# Altium footprint library Footprints.PcbLib: 34 footprints (part 2 of 3)
Each footprint in its own frame and in the unit in brackets; x right, y up, seen from the top. Pads: shape width x height; smd on the part's side, far side on the other; paste and mask are expansions set on the pad; w line width, h text height; cw(c..) or ccw(c..) is an arc to the next point about the centre after c.
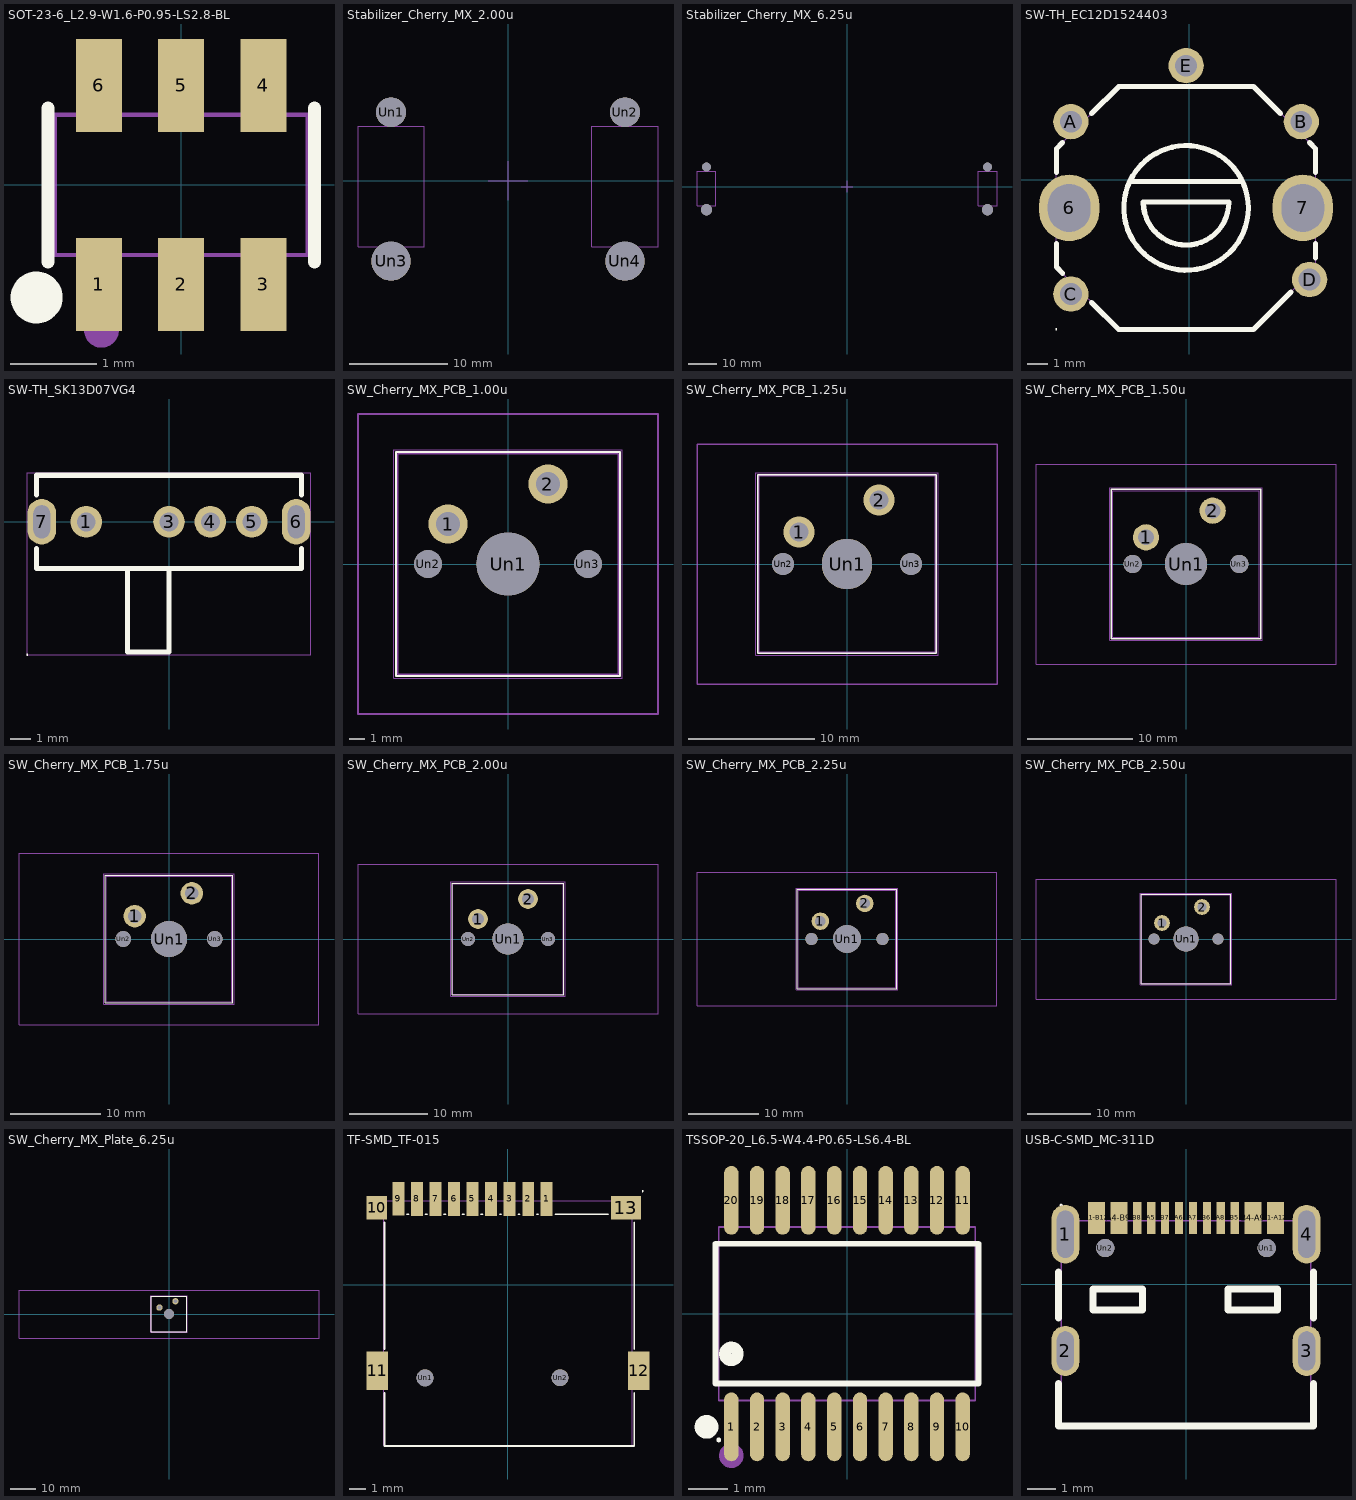
[diagram p1: the footprints below, top view; thin cyan lines are the x and y axes]

## SOT-23-6_L2.9-W1.6-P0.95-LS2.8-BL [mm]
pads (6):
  rect 0.532x1.072 smd: 1(-0.95,-1.15) 2(0,-1.15) 3(0.95,-1.15) 4(0.95,1.15) 5(0,1.15) 6(-0.95,1.15)
F.SilkS:
  circle w0.3: c-1.67,-1.3 r0.15
  circle w0.06: c-1.46,-1.4 r0.03
  lines w0.15: -1.54,-0.89 -1.54,0.89 ; 1.54,-0.89 1.54,0.89
Top Courtyard:
  lines w0.05: -1.46,-0.81 -1.46,0.81 1.46,0.81 1.46,-0.81 -1.46,-0.81
F.Fab:
  text "'.Designator'" at -4.047,-0.84 h1
Cmts.User:
  circle w0.2: c-0.92,-1.68 r0.1
3D body "SOT-23-6_L2.9-W1.6-H1.5-LS2.8-P0.95.step": height 1.6, standoff -0.05, extent -1.45,-1.406 1.45,1.406

## Stabilizer_Cherry_MX_2.00u [mil]
pads (4):
  round 120 hole 120: Un1(-470,275) Un2(470,275)
  round 157 hole 157: Un3(-470,-323.82) Un4(470,-323.82)
Top Assembly:
  lines w3.94: -78.74,0 78.74,0 ; 0,-78.74 0,78.74
F.Fab:
  text "'.Designator'" at -159.32,-33.08 h39.37
Eco1.User:
  lines w3.94: -602.87,-266.54 -337.13,-266.54 -337.13,217.72 -602.87,217.72 -602.87,-266.54 ; 337.13,-266.54 602.87,-266.54 602.87,217.72 337.13,217.72 337.13,-266.54
3D body "Stabilizer_Cherry_MX_2.00u.stp": height 608.27, standoff -112.2, extent -603.94,-433.07 603.94,322.83

## Stabilizer_Cherry_MX_6.25u [mil]
pads (4):
  round 120 hole 120: Un1(-1968.5,275) Un2(1968.5,275)
  round 157 hole 157: Un3(-1968.5,-323.82) Un4(1968.5,-323.82)
Top Assembly:
  lines w3.94: -78.74,0 78.74,0 ; 0,-78.74 0,78.74
F.Fab:
  text "'.Designator'" at -159.32,-33.08 h39.37
Eco1.User:
  lines w3.94: -2101.38,-266.54 -1835.63,-266.54 -1835.63,217.72 -2101.38,217.72 -2101.38,-266.54 ; 1835.63,-266.54 2101.38,-266.54 2101.38,217.72 1835.63,217.72 1835.63,-266.54
3D body "Stabilizer_Cherry_MX_6.25u.stp": height 608.27, standoff -112.2, extent -2102.36,-433.07 2102.36,322.83

## SW-TH_EC12D1524403 [mm]
pads (7):
  rrect100% 2.9x3.2 hole 2.3 slot 2.05 at 0 deg: 6(-5.79,-1.35) 7(5.46,-1.35)
  round 1.7 hole 1.05: A(-5.71,2.8) B(5.39,2.8) C(-5.71,-5.5) D(5.79,-4.8) E(-0.16,5.5)
F.SilkS:
  circle w0.06: c-6.41,-7.2 r0.03
  circle w0.25: c-0.16,-1.35 r3
  lines w0.25: -6.41,-3.06 -6.41,-4.2 -6.12,-4.5 ; -6.41,0.36 -6.41,1.5 -6.11,1.8 ; -4.71,-5.9 -3.42,-7.2 3.08,-7.2 4.89,-5.4 ; -4.71,3.2 -3.42,4.48 ; -3.42,4.5 3.09,4.5 3.09,4.49 4.38,3.2 ; -2.86,-0.08 2.55,-0.08 ; -2.22,-1.12 ccw(c-0.16,-1.08) 1.9,-1.08 ; -2.22,-1.07 1.87,-1.07 ; 5.79,1.8 6.08,1.5 6.08,0.36 ; 6.08,-3.76 6.08,-3.06
Top Courtyard:
  lines w0.05: -6.41,-4.2 -3.41,-7.2 3.09,-7.2 6.09,-4.2 6.09,1.5 3.09,4.5 -3.41,4.5 -6.41,1.5 -6.41,-4.2
F.Fab:
  text "'.Designator'" at -4.047,-0.84 h1
3D body "SW-TH_EC12D1524403-L12.5-W11.7-H17.5-P11.1-LS14.1.step": height 17.5, standoff -3.7, extent -6.377,-7.247 6.123,5.553

## SW-TH_SK13D07VG4 [mil]
pads (6):
  round 60 hole 36: 1(-157.48,0) 3(0,0) 4(78.74,0) 5(157.48,0)
  rrect100% 55.12x86.61 hole 62.99 slot 31.5 at 0 deg: 6(242.13,0) 7(-242.13,0)
F.SilkS:
  circle w2.36: c-269.69,-253.15 r1.18
  lines w9.84: -251.97,-51.18 -251.97,-88.58 251.97,-88.58 251.97,-51.18 ; -251.97,51.18 -251.97,88.58 251.97,88.58 251.97,51.18 ; -79.13,-88.58 -79.13,-248.03 0,-248.03 0,-88.58
Top Courtyard:
  lines w1.97: -269.69,-253.15 -269.69,93.7 269.69,93.7 269.69,-253.15 -269.69,-253.15
F.Fab:
  circle w14.17: c-157.48,0 r7.09
  circle w14.17: c0,0 r7.09
  circle w14.17: c78.74,0 r7.09
  circle w14.17: c157.48,0 r7.09
  text "'.Designator'" at -159.32,-33.08 h39.37
3D body "SW-TH_SK13D07VG4.step": height 185.04, standoff -133.79, extent -248.03,-244.09 248.03,86.61

## SW_Cherry_MX_PCB_1.00u [mm]
pads (5):
  round 2.5 hole 1.5: 1(-3.81,2.54) 2(2.54,5.08)
  round 4 hole 4: Un1(0,0)
  round 1.75 hole 1.75: Un2(-5.08,0) Un3(5.08,0)
F.SilkS:
  lines w0.12: -7.1,-7.1 7.1,-7.1 7.1,7.1 -7.1,7.1 -7.1,-7.1
Top Assembly:
  lines w0.1: -9.525,-9.525 9.525,-9.525 9.525,9.525 -9.525,9.525 -9.525,-9.525
Top Courtyard:
  lines w0.05: -7.25,-7.25 7.25,-7.25 7.25,7.25 -7.25,7.25 -7.25,-7.25
F.Fab:
  lines w0.1: -7,-7 7,-7 7,7 -7,7 -7,-7
  text "'.Designator'" at -1.439,-0.398 h1
Eco1.User:
  lines w0.1: -7,-7 7,-7 7,7 -7,7 -7,-7
3D body "SW_Cherry_MX_PCB.stp": height 15.44, standoff -3.16, extent -7.807,-7.807 7.793,7.793
3D body: height 0.25, standoff 0, extent -7.807,-7.807 7.793,7.793

## SW_Cherry_MX_PCB_1.25u [mm]
pads (5):
  round 2.5 hole 1.5: 1(-3.81,2.54) 2(2.54,5.08)
  round 4 hole 4: Un1(0,0)
  round 1.75 hole 1.75: Un2(-5.08,0) Un3(5.08,0)
F.SilkS:
  lines w0.12: -7.1,-7.1 -7.1,7.1 7.1,7.1 7.1,-7.1 -7.1,-7.1
Top Assembly:
  lines w0.1: -11.906,-9.525 -11.906,9.525 11.906,9.525 11.906,-9.525 -11.906,-9.525
Top Courtyard:
  lines w0.05: -7.25,-7.25 -7.25,7.25 7.25,7.25 7.25,-7.25 -7.25,-7.25
F.Fab:
  lines w0.1: -7,-7 -7,7 7,7 7,-7 -7,-7
  text "'.Designator'" at -1.439,-0.398 h1
Eco1.User:
  lines w0.1: -7,-7 -7,7 7,7 7,-7 -7,-7
3D body "SW_Cherry_MX_PCB.stp": height 15.44, standoff -3.16, extent -7.802,-7.826 7.798,7.774

## SW_Cherry_MX_PCB_1.50u [mm]
pads (5):
  round 2.5 hole 1.5: 1(-3.81,2.54) 2(2.54,5.08)
  round 4 hole 4: Un1(0,0)
  round 1.75 hole 1.75: Un2(-5.08,0) Un3(5.08,0)
F.SilkS:
  lines w0.12: -7.1,-7.1 7.1,-7.1 7.1,7.1 -7.1,7.1 -7.1,-7.1
Top Assembly:
  lines w0.1: -14.287,-9.525 14.287,-9.525 14.287,9.525 -14.287,9.525 -14.287,-9.525
Top Courtyard:
  lines w0.05: -7.25,-7.25 7.25,-7.25 7.25,7.25 -7.25,7.25 -7.25,-7.25
F.Fab:
  lines w0.1: -7,-7 7,-7 7,7 -7,7 -7,-7
  text "'.Designator'" at -1.439,-0.398 h1
Eco1.User:
  lines w0.1: -7,-7 7,-7 7,7 -7,7 -7,-7
3D body "SW_Cherry_MX_PCB.stp": height 15.44, standoff -3.16, extent -7.807,-7.807 7.793,7.793

## SW_Cherry_MX_PCB_1.75u [mm]
pads (5):
  round 2.5 hole 1.5: 1(-3.81,2.54) 2(2.54,5.08)
  round 4 hole 4: Un1(0,0)
  round 1.75 hole 1.75: Un2(-5.08,0) Un3(5.08,0)
F.SilkS:
  lines w0.12: -7.1,-7.1 -7.1,7.1 7.1,7.1 7.1,-7.1 -7.1,-7.1
Top Assembly:
  lines w0.1: -16.669,-9.525 -16.669,9.525 16.669,9.525 16.669,-9.525 -16.669,-9.525
Top Courtyard:
  lines w0.05: -7.25,-7.25 -7.25,7.25 7.25,7.25 7.25,-7.25 -7.25,-7.25
F.Fab:
  lines w0.1: -7,-7 -7,7 7,7 7,-7 -7,-7
  text "'.Designator'" at -1.439,-0.398 h1
Eco1.User:
  lines w0.1: -7,-7 -7,7 7,7 7,-7 -7,-7
3D body "SW_Cherry_MX_PCB.stp": height 15.44, standoff -3.16, extent -7.851,-7.775 7.749,7.825

## SW_Cherry_MX_PCB_2.00u [mm]
pads (5):
  round 2.5 hole 1.5: 1(-3.81,2.54) 2(2.54,5.08)
  round 4 hole 4: Un1(0,0)
  round 1.75 hole 1.75: Un2(-5.08,0) Un3(5.08,0)
F.SilkS:
  lines w0.12: -7.1,-7.1 -7.1,7.1 7.1,7.1 7.1,-7.1 -7.1,-7.1
Top Assembly:
  lines w0.1: -19.05,-9.525 -19.05,9.525 19.05,9.525 19.05,-9.525 -19.05,-9.525
Top Courtyard:
  lines w0.05: -7.25,-7.25 -7.25,7.25 7.25,7.25 7.25,-7.25 -7.25,-7.25
F.Fab:
  lines w0.1: -7,-7 -7,7 7,7 7,-7 -7,-7
  text "'.Designator'" at -1.439,-0.398 h1
Eco1.User:
  lines w0.1: -7,-7 -7,7 7,7 7,-7 -7,-7
3D body "SW_Cherry_MX_PCB.stp": height 15.44, standoff -3.16, extent -7.807,-7.807 7.793,7.793

## SW_Cherry_MX_PCB_2.25u [mm]
pads (5):
  round 2.5 hole 1.5: 1(-3.81,2.54) 2(2.54,5.08)
  round 4 hole 4: Un1(0,0)
  round 1.75 hole 1.75: Un2(-5.08,0) Un3(5.08,0)
F.SilkS:
  lines w0.12: -7.1,-7.1 7.1,-7.1 7.1,7.1 -7.1,7.1 -7.1,-7.1
Top Assembly:
  lines w0.1: -21.431,-9.525 21.431,-9.525 21.431,9.525 -21.431,9.525 -21.431,-9.525
Top Courtyard:
  lines w0.05: -7.25,-7.25 7.25,-7.25 7.25,7.25 -7.25,7.25 -7.25,-7.25
F.Fab:
  lines w0.1: -7,-7 7,-7 7,7 -7,7 -7,-7
  text "'.Designator'" at -1.439,-0.398 h1
Eco1.User:
  lines w0.1: -7,-7 7,-7 7,7 -7,7 -7,-7
3D body "SW_Cherry_MX_PCB.stp": height 15.44, standoff -3.16, extent -7.755,-7.772 7.845,7.828

## SW_Cherry_MX_PCB_2.50u [mm]
pads (5):
  round 2.5 hole 1.5: 1(-3.81,2.54) 2(2.54,5.08)
  round 4 hole 4: Un1(0,0)
  round 1.75 hole 1.75: Un2(-5.08,0) Un3(5.08,0)
F.SilkS:
  lines w0.12: -7.1,-7.1 -7.1,7.1 7.1,7.1 7.1,-7.1 -7.1,-7.1
Top Assembly:
  lines w0.1: -23.812,-9.525 -23.812,9.525 23.812,9.525 23.812,-9.525 -23.812,-9.525
Top Courtyard:
  lines w0.05: -7.25,-7.25 -7.25,7.25 7.25,7.25 7.25,-7.25 -7.25,-7.25
F.Fab:
  lines w0.1: -7,-7 -7,7 7,7 7,-7 -7,-7
  text "'.Designator'" at -1.439,-0.398 h1
Eco1.User:
  lines w0.1: -7,-7 -7,7 7,7 7,-7 -7,-7
3D body "SW_Cherry_MX_PCB.stp": height 15.44, standoff -3.16, extent -7.807,-7.807 7.793,7.793

## SW_Cherry_MX_Plate_6.25u [mm]
pads (3):
  round 2.5 hole 1.5: 1(-3.81,2.54) 2(2.54,5.08)
  round 4 hole 4: Un1(0,0)
F.SilkS:
  lines w0.12: -7.1,-7.1 -7.1,7.1 7.1,7.1 7.1,-7.1 -7.1,-7.1
Top Assembly:
  lines w0.1: -59.531,-9.525 -59.531,9.525 59.531,9.525 59.531,-9.525 -59.531,-9.525
Top Courtyard:
  lines w0.05: -7.25,-7.25 -7.25,7.25 7.25,7.25 7.25,-7.25 -7.25,-7.25
F.Fab:
  lines w0.1: -7,-7 -7,7 7,7 7,-7 -7,-7
  text "'.Designator'" at -1.439,-0.398 h1
Eco1.User:
  lines w0.1: -7,-7 -7,7 7,7 7,-7 -7,-7
3D body "SW_Cherry_MX_PCB.stp": height 15.44, standoff -3.16, extent -7.772,-7.755 7.828,7.845

## TF-SMD_TF-015 [mm]
pads (15):
  rect 0.7x2 smd: 1(2.3,5.09) 2(1.21,5.09) 3(0.11,5.09) 4(-0.99,5.09) 5(-2.09,5.09) 6(-3.18,5.09) 7(-4.28,5.09) 8(-5.38,5.09) 9(-6.48,5.1)
  rect 1.2x1.397 smd: 10(-7.76,4.56)
  rect 1.27x2.286 smd: 11(-7.73,-5.1) 12(7.76,-5.09)
  rect 1.778x1.397 smd: 13(7,4.56)
  round 1 hole 1: Un1(-4.9,-5.51) Un2(3.1,-5.5)
F.SilkS:
  circle w0.06: c7.99,5.55 r0.03
  lines w0.1: -7.3,-6.39 -7.3,-9.55 7.5,-9.55 7.5,-6.39 ; -7.3,-3.8 -7.3,3.7 ; -5.98,4.19 -5.88,4.19 ; -4.87,4.19 -4.78,4.19 ; -3.78,4.19 -3.69,4.19 ; -2.68,4.19 -2.59,4.19 ; -1.58,4.19 -1.49,4.19 ; -0.48,4.19 -0.39,4.19 ; 0.62,4.19 0.7,4.19 ; 1.71,4.19 1.8,4.19 ; 2.81,4.19 5.96,4.19 ; 7.5,-3.8 7.5,3.7
Top Courtyard:
  lines w0.05: -7.36,-9.5 7.39,-9.5 7.39,5 -7.36,5 -7.36,-9.5
F.Fab:
  text "'.Designator'" at -4.047,-0.84 h1
Cmts.User:
  circle w0.4: c3.1,-5.5 r0.2
  circle w0.4: c-4.9,-5.51 r0.2
3D body "TF-SMD_L14.8-W14.5-H1.9-P1.1.step": height 2, standoff -0.45, extent -7.939,-9.461 8.061,5.789
3D body "TF-SMD_L14.8-W14.5-H1.9-P1.1.step": height 2, standoff -0.45, extent -7.939,-9.461 8.061,5.789

## TSSOP-20_L6.5-W4.4-P0.65-LS6.4-BL [mm]
pads (20):
  rrect100% 0.364x1.742 smd: 1(-2.93,-2.87) 2(-2.28,-2.87) 3(-1.63,-2.87) 4(-0.98,-2.87) 5(-0.32,-2.87) 6(0.33,-2.87) 7(0.98,-2.87) 8(1.63,-2.87) 9(2.28,-2.87) 10(2.93,-2.87) 11(2.93,2.87) 12(2.28,2.87) 13(1.63,2.87) 14(0.98,2.87) 15(0.33,2.87) 16(-0.32,2.87) 17(-0.98,2.87) 18(-1.63,2.87) 19(-2.28,2.87) 20(-2.93,2.87)
F.SilkS:
  circle w0.06: c-3.25,-3.2 r0.03
  circle w0.3: c-3.56,-2.87 r0.15
  circle w0.3: c-2.93,-1.02 r0.16
  lines w0.15: -3.33,-1.77 3.33,-1.77 3.33,1.77 -3.33,1.77 -3.33,-1.77
Top Courtyard:
  lines w0.05: -3.25,-2.2 3.25,-2.2 3.25,2.2 -3.25,2.2 -3.25,-2.2
F.Fab:
  text "'.Designator'" at -4.047,-0.84 h1
Cmts.User:
  circle w0.3: c-2.93,-3.6 r0.16
3D body "TSSOP-20_L6.5-W4.4-H1.0-LS6.4-P0.65.step": height 1.03, standoff -0.02, extent -3.25,-3.203 3.25,3.203

## USB-C-SMD_MC-311D [mm]
pads (18):
  rrect100% 1x2.1 hole 1.7 slot 0.6 at 0 deg: 1(-4.32,1.8) 4(4.32,1.8)
  rrect100% 1x1.8 hole 1.4 slot 0.6 at 0 deg: 2(-4.32,-2.38) 3(4.32,-2.38)
  rect 0.6x1.15 smd: A1-B12(-3.2,2.38) A4-B9(-2.4,2.38) B1-A12(3.2,2.38) B4-A9(2.4,2.38)
  rect 0.3x1.15 smd: A5(-1.25,2.38) A6(-0.25,2.38) A7(0.25,2.38) A8(1.25,2.38) B5(1.75,2.38) B6(0.75,2.38) B7(-0.75,2.38) B8(-1.75,2.38)
  round 0.65 hole 0.65: Un1(2.89,1.3) Un2(-2.89,1.3)
F.SilkS:
  circle w0.06: c-4.47,2.83 r0.03
  lines w0.25: -4.57,-3.55 -4.57,-5.07 4.57,-5.07 4.57,-3.55 ; -4.57,-1.2 -4.57,0.45 ; 4.57,-1.2 4.57,0.45 ; -3.33,-0.92 -3.33,-0.16 -1.55,-0.16 -1.55,-0.92 -3.33,-0.92 ; 1.5,-0.92 1.5,-0.16 3.27,-0.16 3.27,-0.92 1.5,-0.92
Top Courtyard:
  lines w0.05: -4.47,-5.07 4.47,-5.07 4.47,2.28 -4.47,2.28 -4.47,-5.07
F.Fab:
  text "'.Designator'" at -4.047,-0.84 h1
Cmts.User:
  circle w0.25: c2.89,1.3 r0.12
  circle w0.25: c-2.89,1.3 r0.12
3D body "USB-3.1-SMD_16P-L8.9-W7.3-H3.3-P0.5.step": height 3.25, standoff -0.85, extent -4.47,-4.966 4.47,2.934